# Altium footprint library aksima_footprint.PcbLib: 77 footprints (part 5 of 5)
Each footprint in its own frame and in the unit in brackets; x right, y up, seen from the top. Pads: shape width x height; smd on the part's side, far side on the other; paste and mask are expansions set on the pad; w line width, h text height; cw(c..) or ccw(c..) is an arc to the next point about the centre after c.
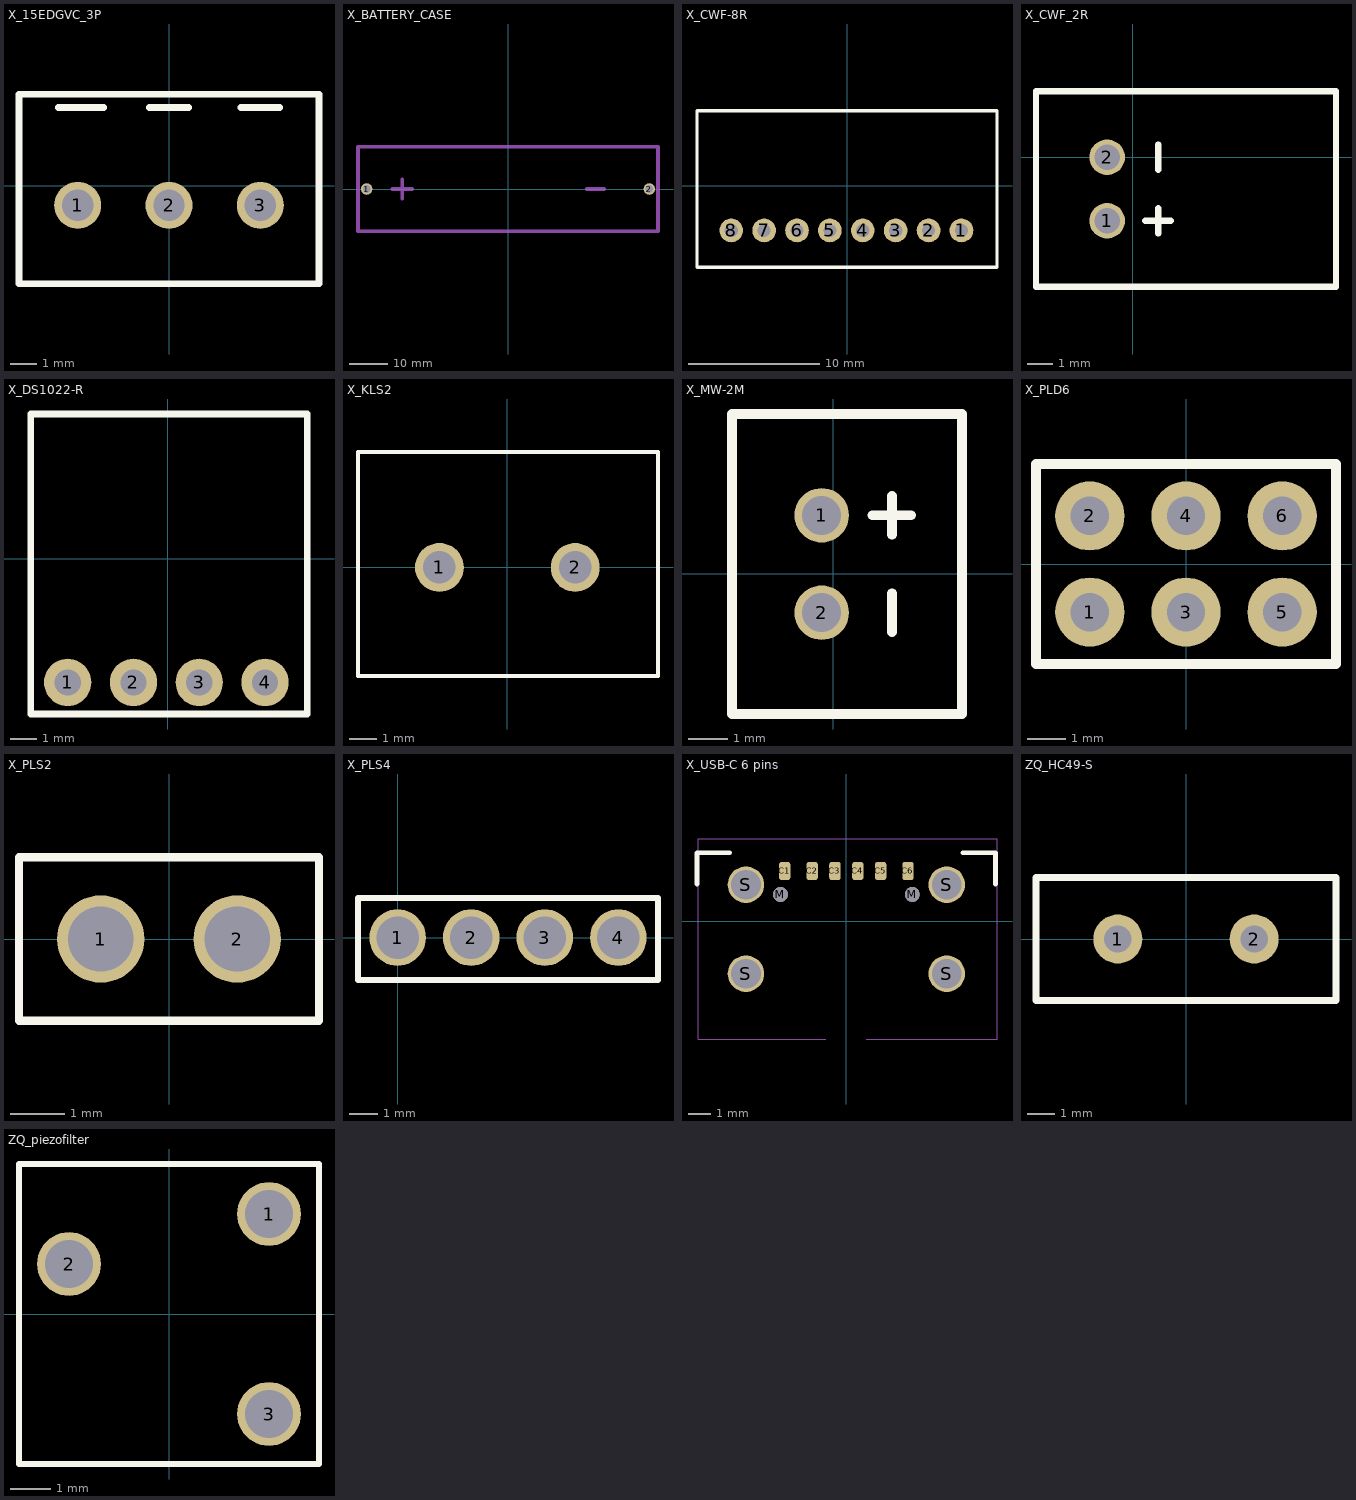
[diagram p4: the footprints below, top view; thin cyan lines are the x and y axes]

## X_15EDGVC_3P [mm] "Connector footprint, 15EDGVC 3P"
pads (3):
  round 1.8 hole 1.2: 1(-3.5,-0.75) 2(0,-0.75) 3(3.5,-0.75)
Top Overlay:
  lines w0.254: -4.25,3 -2.5,3 ; -0.75,3 0.75,3 ; 2.75,3 4.25,3 ; -5.75,-3.75 5.75,-3.75 5.75,3.5 -5.75,3.5 -5.75,-3.75
3D body "15EDGVC-3.5-03P-14-00AH.STEP": height 9.2, standoff -3.4, extent -5.65,-3.75 5.65,3.45

## X_BATTERY_CASE [mm] "Connector footprint, BATTERY CASE"
pads (2):
  round 3 hole 2: 1(-36.75,0) 2(36.75,0)
Bottom 3D Body:
  lines w1: -39,10.5 -39,-11 39,-11 39,11 -39,11 ; -30,0 -25,0 ; -27.5,-2.5 -27.5,2.5 ; 20.5,0 25,0
3D body "Porta_18650.STEP": height 21, standoff -4, extent -38.5,-10 38.5,10

## X_CWF-8R [mm] "8-position connector, CWF-8R"
pads (8):
  round 1.8 hole 1: 1(8.7,-3.4) 2(6.2,-3.4) 3(3.7,-3.4) 4(1.2,-3.4) 5(-1.3,-3.4) 6(-3.8,-3.4) 7(-6.3,-3.4) 8(-8.8,-3.4)
Top Overlay:
  lines w0.254: -11.4,-6.2 11.4,-6.2 11.4,5.7 -11.4,5.7 -11.4,-6.2
3D body "DS1069-8 CWF-8R.stp": height 5.75, standoff -3.5, extent -11.25,-6 11.25,5.5

## X_CWF_2R [mm] "Connector footprint, CWF 2R"
pads (2):
  round 1.4 hole 1: 1(-1,-2.5) 2(-1,0)
Top Overlay:
  lines w0.254: 0.5,-2.5 1.5,-2.5 ; 1,-3 1,-2 ; 1,-0.5 1,0.5 ; -3.8,-5.1 8,-5.1 8,2.6 -3.8,2.6 -3.8,-5.1
3D body "DS1069-2 CWF-2R.stp": height 5.75, standoff -3.5, extent -3.62,-5 7.88,2.5

## X_DS1022-R [mm] "Right-angle pin header, DS1022 series"
pads (4):
  round 1.8 hole 1: 1(-3.8,-4.7) 2(-1.3,-4.7) 3(1.2,-4.7) 4(3.7,-4.7)
Top Overlay:
  lines w0.254: -5.2,-5.9 5.3,-5.9 5.3,5.5 -5.2,5.5 -5.2,-5.9
3D body "DS1022-1x4RDF11.stp": height 2.54, standoff -3, extent -5.08,-5 5.08,5.35

## X_KLS2 [mm] "Connector footprint, KLS2"
pads (2):
  round 1.8 hole 1.2: 1(-2.5,0) 2(2.5,0)
Top Overlay:
  lines w0.15: -5.5,-4 5.55,-4 5.55,4.25 -5.5,4.25 -5.5,-4
3D body "KF301-5-2P_blue.step": height 10.46, standoff -3.7, extent -5.15,-3.7 5.2,3.9

## X_MW-2M [mm] "Connector footprint, MW-2M"
pads (2):
  round 1.4 hole 1: 1(-0.3,1.5) 2(-0.3,-1)
Top Overlay:
  lines w0.254: 1,1.5 2,1.5 ; 1.5,-1.5 1.5,-0.5 ; 1.5,1 1.5,2 ; -2.6,-3.6 3.3,-3.6 3.3,4.1 -2.6,4.1 -2.6,-3.6
3D body "2 Pin RMC Header.step": height 7, standoff -2.87, extent -2.5,-3.55 3.2,3.95

## X_PLD6 [mm] "6-position dual-row header, PLD-6"
pads (6):
  round 1.8 hole 1: 1(-2.5,-1.25) 2(-2.5,1.25) 3(0,-1.25) 4(0,1.25) 5(2.5,-1.25) 6(2.5,1.25)
Top Overlay:
  lines w0.254: -3.9,-2.6 3.9,-2.6 3.9,2.6 -3.9,2.6 -3.9,-2.6
3D body "PLD6.stp": height 8.54, standoff -3, extent -3.81,-2.54 3.81,2.54

## X_PLS2 [mm] "Connector footprint, PLS2"
pads (2):
  round 1.6 hole 1.2 unplated: 1(-1.25,0) 2(1.25,0)
Top Overlay:
  lines w0.15: -2.75,-1.5 2.75,-1.5 2.75,1.5 -2.75,1.5 -2.75,-1.5
3D body "PLS-2.step": height 9, standoff -2.5, extent -2.5,-1.202 2.55,1.202

## X_PLS4 [mm] "Connector footprint, PLS4"
pads (4):
  round 2 hole 1.5: 1(0,0) 2(2.6,0) 3(5.2,0) 4(7.8,0)
Top Overlay:
  lines w0.2: -1.4,-1.5 -1.4,1.4 9.2,1.4 9.2,-1.5 -1.4,-1.5
3D body "PLS-04.stp": height 8.2, standoff -3, extent -1.16,-1.298 9,1.2

## X_USB-C 6 pins [mm] "Connector footprint, USB-C 6 pins"
pads (12):
  rrect50% 0.5x0.8 smd: C1(-2.7,2.2) C2(-1.5,2.2) C3(-0.5,2.2) C4(0.5,2.2) C5(1.5,2.2) C6(2.7,2.2)
  round 0.65 hole 0.65 unplated: M(-2.89,1.175) M(2.89,1.175)
  round 1.6 hole 1.3: S(-4.4,-2.3) S(-4.4,1.6) S(4.4,-2.3) S(4.4,1.6)
Top Overlay:
  circle w0.1: c-4.4,-2.3 r0.7
  lines w0.2: -6.544,1.625 -6.544,3.002 -5.11,3.002 ; 5.1,3.002 6.534,3.002 6.534,1.625
Mechanical 15:
  lines w0.05: -0.899,-5.161 -6.5,-5.161 -6.5,3.602 6.6,3.602 6.6,-5.161 0.879,-5.161
3D body "USB_type_C_smd_6p.stp": height 3.2, standoff -1.27, extent -4.6,-5.25 4.6,2.7

## ZQ_HC49-S [mm] "Quartz crystal, HC-49/S"
pads (2):
  round 1.8 hole 1: 1(-2.5,0) 2(2.5,0)
Top Overlay:
  lines w0.254: -5.5,-2.25 5.5,-2.25 5.5,2.25 -5.5,2.25 -5.5,-2.25
3D body "Quartz_HC49-S-Quartz_Cristal_Unit_HC49-S.step": height 3.36, standoff -3.07, extent -5.347,-2.209 5.347,2.209

## ZQ_piezofilter [mm] "Frequency filter footprint, piezofilter"
pads (3):
  round 1.6 hole 1.2: 1(2.5,2.5) 2(-2.5,1.25) 3(2.5,-2.5)
Top Overlay:
  lines w0.15: -3.75,-3.75 3.75,-3.75 3.75,3.75 -3.75,3.75 -3.75,0.25 -3.75,-3.75
3D body "Filter.stp": height 10, standoff -2.3, extent -3.6,-3.75 3.6,3.75